# Altium footprint library EMI_Filter.PcbLib: 5 footprints
Each footprint in its own frame and in the unit in brackets; x right, y up, seen from the top. Pads: shape width x height; smd on the part's side, far side on the other; paste and mask are expansions set on the pad; w line width, h text height; cw(c..) or ccw(c..) is an arc to the next point about the centre after c.
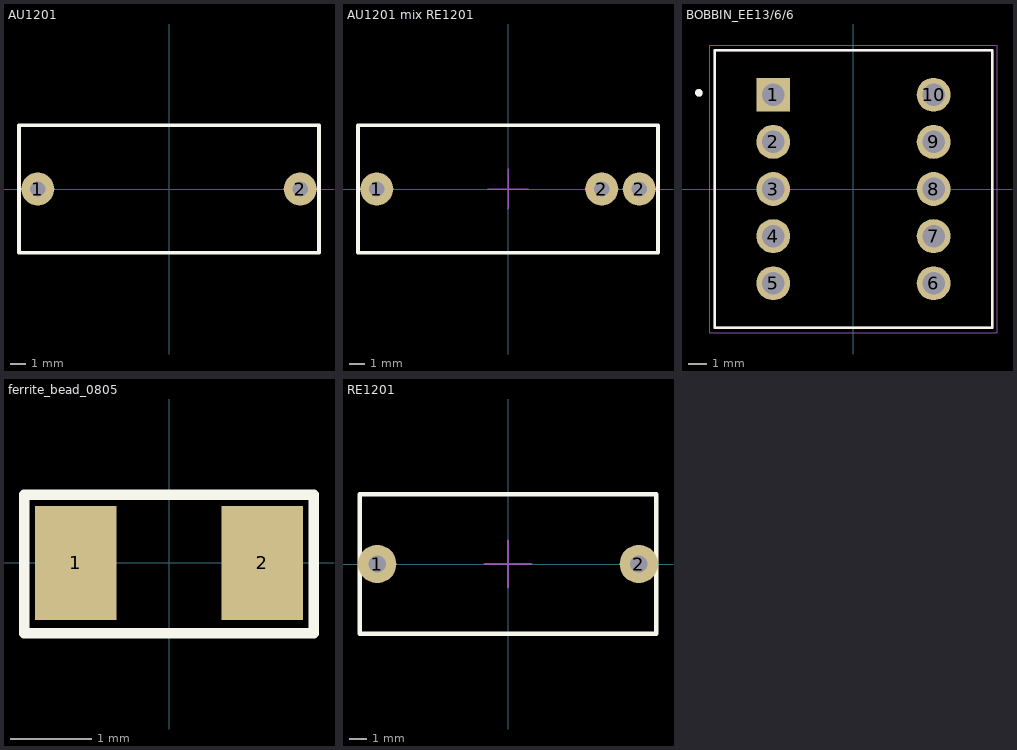
[diagram p0: the footprints below, top view; thin cyan lines are the x and y axes]

## AU1201 [mm] "20x8x17 mm"
pads (2):
  round 2.2 hole 1: 1(-8.75,0) 2(8.75,0)
Top Overlay:
  lines w0.254: -10,-4.25 -10,4.25 10,4.25 10,-4.25 -10,-4.25
Top Designator (Mech4):
  text ".Designator" at -3.71,-0.344 h1.52
3D body: height 17, standoff 0, extent -10,-4.25 10,4.25
3D body: height 1, standoff -2, extent -9.05,-0.3 -8.45,0.3
3D body: height 1, standoff -2, extent 8.45,-0.3 9.05,0.3

## AU1201 mix RE1201 [mm] "20x8x17 mm"
pads (3):
  round 2.2 hole 1: 1(-8.75,0) 2(6.25,0) 2(8.75,0)
Top Overlay:
  lines w0.254: -10,-4.25 -10,4.25 10,4.25 10,-4.25 -10,-4.25
Top Designator (Mech4):
  text ".Designator" at -3.71,-0.344 h1.52
Mechanical 15:
  lines w0.1: -1.363,0 1.363,0 ; 0,-1.363 0,1.363
3D body: height 17, standoff 0, extent -10,-4.25 10,4.25
3D body: height 1, standoff -2, extent -9.05,-0.3 -8.45,0.3
3D body: height 1, standoff -2, extent 8.45,-0.3 9.05,0.3

## BOBBIN_EE13/6/6 [mm]
pads (10):
  rect 1.8x1.8 hole 1.2: 1(-4.255,5)
  round 1.8 hole 1.2: 2(-4.255,2.5) 3(-4.255,0) 4(-4.255,-2.5) 5(-4.255,-5) 6(4.255,-5) 7(4.255,-2.5) 8(4.255,0) 9(4.255,2.5) 10(4.255,5)
Top Overlay:
  circle w0.2: c-8.2,5.1 r0.1
  lines w0.127: -7.365,-7.365 -7.365,7.365 7.365,7.365 7.365,-7.365 -7.365,-7.365
Top Designator (Mech4):
  text ".Designator" at -4.09,-0.344 h1.52
Mechanical 13:
  circle w0.2: c-8.2,5.1 r0.1
  lines w0.127: -7.365,-7.365 7.365,-7.365 7.365,7.365 -7.365,7.365 -7.365,-7.365
Mechanical 15:
  lines w0.05: -7.615,-7.615 7.615,-7.615 7.615,7.615 -7.615,7.615 -7.615,-7.615

## ferrite_bead_0805 [mil] "0805 (2012 Metric)"
pads (2):
  rect 39.37x55 smd: 1(-45,0) 2(45,0)
Top Overlay:
  lines w5: -70,-34 -70,33 70,33 70,-34 -70,-34
Top Designator (Mech4):
  text ".Designator" at -146.08,-14.04 h60
3D body "ferrite_bead_0805.STEP": height 35.43, standoff 0, extent -39.37,-24.12 39.37,23.12

## RE1201 [mm] "17x8x15.5 mm"
pads (2):
  round 2.2 hole 1: 1(-7.5,0) 2(7.5,0)
Top Overlay:
  lines w0.254: -8.5,-4 8.5,-4 8.5,4 -8.5,4 -8.5,-4
Top Designator (Mech4):
  text ".Designator" at -3.71,-0.344 h1.52
Mechanical 15:
  lines w0.1: -1.363,0 1.363,0 ; 0,-1.363 0,1.363
3D body: height 1, standoff -2, extent 7.2,-0.3 7.8,0.3
3D body: height 1, standoff -2, extent -7.8,-0.3 -7.2,0.3
3D body: height 15.5, standoff 0, extent -8.5,-4 8.5,4